# EAGLE library part 6103XX21821_61032621821 (library WR-PHD)
WR-PHD 2.54 mm SMT Dual Socket Header (Reel) ARTICLE PROPERTIES Pins ： 4;​ 6;​ 8;​ 10;​ 12;​ 14;​ 16;​ 18;​ 20;​ 22;​ 24;​ 26 KIND PROPERTIES Pitch 2.54 mm Quality Class 3 as per CECC 75 301-802 Rows Dual Gender Socket Header Type Straight Type 2 MATERIAL PROPERTIES Insulator Material PA46 Insulator Flammability Rating UL94 V-0 Contact Material Copper Alloy Contact Plating Gold Contact Type Stamped GENERAL INFORMATION Operating Temperature -40 up to +105 °C ELECTRICAL PROPERTIES Rated Current 3 A IR1 = 3A Withstanding Voltage 600 V (AC) Contact Resistance 20 mΩ RISO 1000 MΩ CERTIFICATION UL Approval E323964 PACKAGING PROPERTIES Packaging Tape and Reel with Cap <https://katalog.we-online.com/media/images/v2/o33206v209%20Family_WR-PHD_610xxx21821.jpg> Details see: https://katalog.we-online.com/en/em/PHD_2_54_SMT_DUAL_SOCKET_HEADER_REEL_6103XX21821 Updated by Ella Wu 2019-06-12 2019 (C) Würth Elektronik
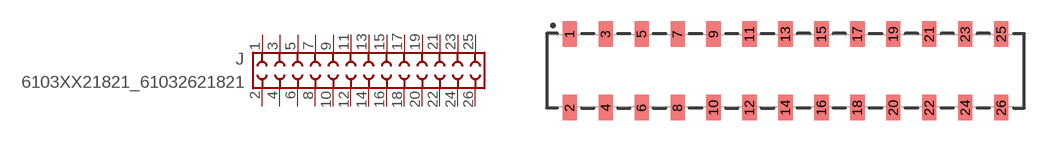
[diagram p264: symbol with the pads of 61032621821; footprint 61032621821]

Designator prefix J

## 6103XX21821_61032621821 (DATASHEET-URL: https://www.we-online.com/redexpert/spec/61032621821?ae; GENDER: Socket Header; IR: 3A; MOUNT: SMT; PACKAGING: Tape and Reel with Cap; PART-NUMBER: 61032621821; PINS: 26; PITCH: 2.54 mm; ROWS: Dual; TYPE: Straight Type 2; VALUE: 61032621821; WE-NUMBER: 61032621821)  [61032621821]
1  1  pas
2  2  pas
3  3  pas
4  4  pas
5  5  pas
6  6  pas
7  7  pas
8  8  pas
9  9  pas
10  10  pas
11  11  pas
12  12  pas
13  13  pas
14  14  pas
15  15  pas
16  16  pas
17  17  pas
18  18  pas
19  19  pas
20  20  pas
21  21  pas
22  22  pas
23  23  pas
24  24  pas
25  25  pas
26  26  pas

## Footprint 61032621821 (pad centres in mm)
WR-PHD 2.54 mm SMT Dual Socket Header (Reel) , 26 Pins
smd 1 x 1.8: 1 -15.24,2.6; 2 -15.24,-2.6; 3 -12.7,2.6; 4 -12.7,-2.6; 5 -10.16,2.6; 6 -10.16,-2.6; 7 -7.62,2.6; 8 -7.62,-2.6; 9 -5.08,2.6; 10 -5.08,-2.6; 11 -2.54,2.6; 12 -2.54,-2.6; 13 0,2.6; 14 0,-2.6; 15 2.54,2.6; 16 2.54,-2.6; 17 5.08,2.6; 18 5.08,-2.6; 19 7.62,2.6; 20 7.62,-2.6; 21 10.16,2.6; 22 10.16,-2.6; 23 12.7,2.6; 24 12.7,-2.6; 25 15.24,2.6; 26 15.24,-2.6